# Altium schematic symbol library FDN335N.SchLib: 1 symbol
Pins are listed as number, name and electrical type; pins without a type are passive.

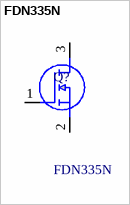
[diagram p0: symbol FDN335N]

## FDN335N
designator Q?
High power and current handling capability.; 1.7 A, 20 V; Low gate charge (3.5nC typical).; High performance trench technology for extremely lowRDS(ON).; RDS(on) = 0.07  @ VGS = 4.5 V; RDS(on) = 0.100  @ VGS = 2.5 V; Manufacturer_Name: onsemi; Geometry.Height: 1.12mm; Mouser Part Number: 512-FDN335N; Mouser Price/Stock: https://www.mouser.co.uk/ProductDetail/onsemi-Fairchild/FDN335N?qs=mdiO5HdF0KhZ%2F6bKTj3K6A%3D%3D; Manufacturer_Part_Number: FDN335N; Datasheet Link: https://www.onsemi.com/pub/Collateral/FDN335N-D.PDF
footprint SOT95P251X112-3N
pins: 1 G, 2 S, 3 D